# Altium footprint library WR-MJ.PcbLib: 101 footprints (part 6 of 7)
Each footprint in its own frame and in the unit in brackets; x right, y up, seen from the top. Pads: shape width x height; smd on the part's side, far side on the other; paste and mask are expansions set on the pad; w line width, h text height; cw(c..) or ccw(c..) is an arc to the next point about the centre after c.
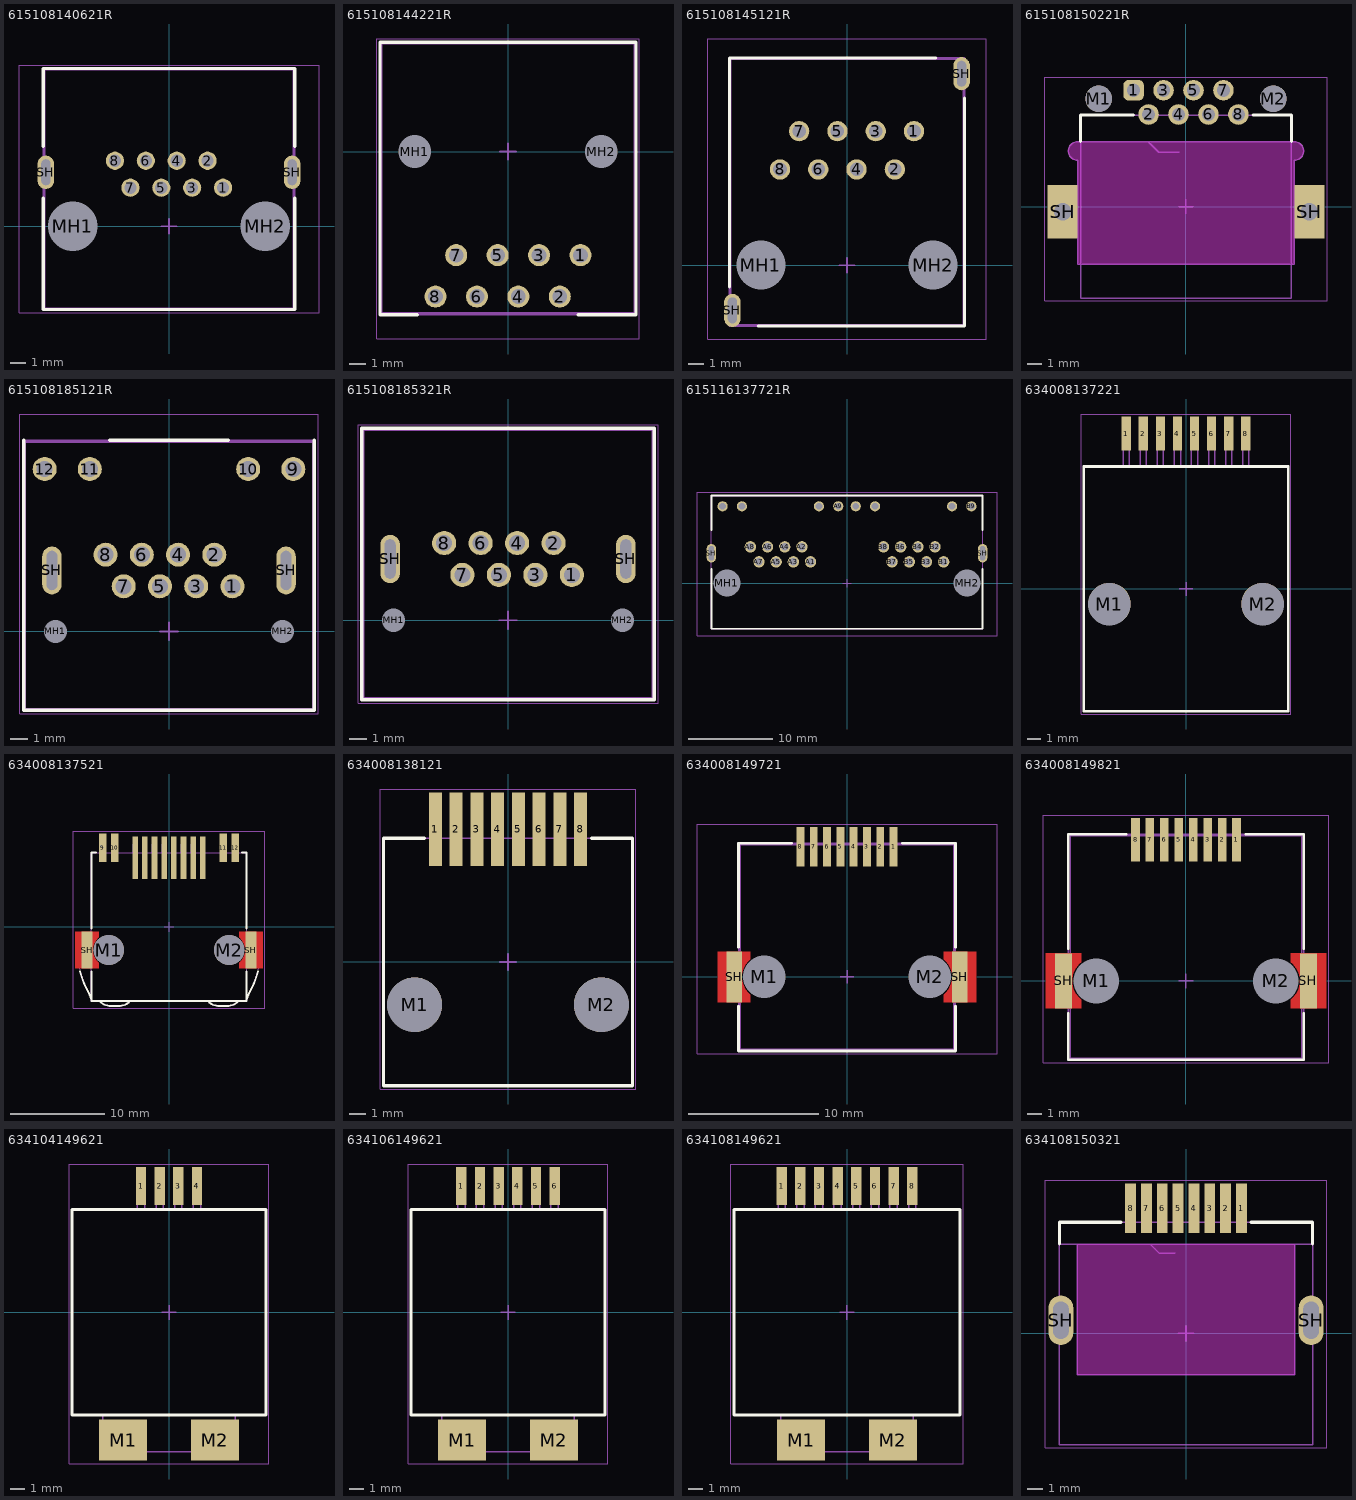
[diagram p5: the footprints below, top view; thin cyan lines are the x and y axes]

## 615108140621R [mm] "Modular Jak"
height 13.5
pads (12):
  round 1.2 hole 0.8: 1(3.57,2.54) 2(2.55,4.32) 3(1.53,2.54) 4(0.51,4.32) 5(-0.51,2.54) 6(-1.53,4.32) 7(-2.55,2.54) 8(-3.57,4.32)
  round 3.15 hole 3.25 unplated: MH1(-6.35,0) MH2(6.35,0)
  oval 1.1x2.2 hole 0.6 slot 1.7 at 90 deg: SH(-8.125,3.56) SH(8.125,3.56)
Top Overlay:
  lines w0.2: -8.3,1.85 -8.3,-5.5 8.3,-5.5 8.3,1.85 ; -8.3,5.25 -8.3,10.41 8.3,10.41 8.3,5.25
Top Paste:
  region: -4.42,6.42 -4.42,3.52 -2.72,3.52 -2.72,6.42
  region: -2.38,6.42 -2.38,3.52 -0.68,3.52 -0.68,6.42
  region: -0.34,6.42 -0.34,3.52 1.36,3.52 1.36,6.42
  region: 1.7,6.42 1.7,3.52 3.4,3.52 3.4,6.42
  region: -1.7,0.44 -1.7,3.34 -3.4,3.34 -3.4,0.44
  region: 0.34,0.44 0.34,3.34 -1.36,3.34 -1.36,0.44
  region: 2.38,0.44 2.38,3.34 0.68,3.34 0.68,0.44
  region: 4.42,0.44 4.42,3.34 2.72,3.34 2.72,0.44
  region: 6.725,5.01 9.525,5.01 9.525,2.11 6.725,2.11
  region: -9.525,5.01 -6.725,5.01 -6.725,2.11 -9.525,2.11
Assembly Notes:
  text "Stencil Thickness 120 um" at -7.571,-6.78 h1.5
Top Assembly:
  lines w0.1: -8.3,-5.5 8.3,-5.5 8.3,10.41 -8.3,10.41 -8.3,-5.5
Top Designator:
  text ".Designator" at -3.647,-0.357 h1
Top 3D Body:
  lines w0.1: -8.2,-5.4 -8.2,10.31 8.2,10.31 8.2,-5.4 -8.2,-5.4
Top Courtyard:
  lines w0.05: -9.9,-5.7 9.9,-5.7 9.9,10.61 -9.9,10.61 -9.9,-5.7
Top Component Center:
  lines w0.1: -0.5,0 0.5,0 ; 0,-0.5 0,0.5
3D body "615108140621R.stp": height 15.06, standoff -2.54, extent -9.7,-5.4 9.7,10.31

## 615108144221R [mm] "Modular Jak"
height 16.41
pads (10):
  round 1.35 hole 0.9: 1(4.445,-6.35) 2(3.175,-8.89) 3(1.905,-6.35) 4(0.635,-8.89) 5(-0.635,-6.35) 6(-1.905,-8.89) 7(-3.175,-6.35) 8(-4.445,-8.89)
  round 1.9 hole 2 unplated: MH1(-5.715,0) MH2(5.715,0)
Top Overlay:
  lines w0.2: -5.55,-10 -7.85,-10 -7.85,6.7 7.85,6.7 7.85,-10 4.3,-10
Top Paste:
  region: -4.025,-3.95 -4.025,-7.55 -2.325,-7.55 -2.325,-3.95
  region: -1.485,-3.95 -1.485,-7.55 0.215,-7.55 0.215,-3.95
  region: 1.055,-3.95 1.055,-7.55 2.755,-7.55 2.755,-3.95
  region: 3.595,-3.95 3.595,-7.55 5.295,-7.55 5.295,-3.95
  region: 4.025,-11.29 4.025,-7.69 2.325,-7.69 2.325,-11.29
  region: 1.485,-11.29 1.485,-7.69 -0.215,-7.69 -0.215,-11.29
  region: -1.055,-11.29 -1.055,-7.69 -2.755,-7.69 -2.755,-11.29
  region: -3.595,-11.29 -3.595,-7.69 -5.295,-7.69 -5.295,-11.29
Assembly Notes:
  text "Stencil Thickness 120 um" at -7.571,-12.68 h1.5
Top Assembly:
  lines w0.1: -7.85,-10 7.85,-10 7.85,6.7 -7.85,6.7 -7.85,-10
Top Designator:
  text ".Designator" at -3.647,-0.357 h1
Top 3D Body:
  lines w0.1: -7.75,-9.9 -7.75,6.6 7.75,6.6 7.75,-9.9 -7.75,-9.9
Top Courtyard:
  lines w0.05: -8.05,-11.49 -8.05,6.9 8.05,6.9 8.05,-11.49 -8.05,-11.49
Top Component Center:
  lines w0.1: -0.5,0 0.5,0 ; 0,-0.5 0,0.5
3D body "615108144221R.stp": height 16.55, standoff -2.51, extent -7.75,-9.9 7.75,6.6

## 615108145121R [mm] "Modular Jak"
height 21.55
pads (12):
  round 1.35 hole 0.9: 1(4.445,8.89) 2(3.175,6.35) 3(1.905,8.89) 4(0.635,6.35) 5(-0.635,8.89) 6(-1.905,6.35) 7(-3.175,8.89) 8(-4.445,6.35)
  round 3.15 hole 3.25 unplated: MH1(-5.715,0) MH2(5.715,0)
  oval 1.1x2.2 hole 0.6 slot 1.7 at 90 deg: SH(-7.6,-3) SH(7.6,12.7)
Top Overlay:
  lines w0.2: -7.8,-1.45 -7.8,13.75 5.9,13.75 ; -5.9,-4.05 7.8,-4.05 7.8,11.1
Top Paste:
  region: 6.15,11.4 9.05,11.4 9.05,14.4 6.15,14.4
  region: -9.05,-1.7 -6.15,-1.7 -6.15,-4.7 -9.05,-4.7
  region: 3.595,7.69 5.295,7.69 5.295,10.89 3.595,10.89
  region: 1.055,7.69 2.755,7.69 2.755,10.89 1.055,10.89
  region: -1.485,7.69 0.215,7.69 0.215,10.89 -1.485,10.89
  region: -4.025,7.69 -2.325,7.69 -2.325,10.89 -4.025,10.89
  region: -5.295,7.55 -3.595,7.55 -3.595,4.35 -5.295,4.35
  region: -2.755,7.55 -1.055,7.55 -1.055,4.35 -2.755,4.35
  region: -0.215,7.55 1.485,7.55 1.485,4.35 -0.215,4.35
  region: 2.325,7.55 4.025,7.55 4.025,4.35 2.325,4.35
Assembly Notes:
  text "Stencil Thickness 120 um" at -7.571,-5.78 h1.5
Top Assembly:
  lines w0.1: -7.8,-4.05 7.8,-4.05 7.8,13.75 -7.8,13.75 -7.8,-4.05
Top Designator:
  text ".Designator" at -3.647,-0.357 h1
Top 3D Body:
  lines w0.1: -7.7,-3.95 -7.7,13.65 7.7,13.65 7.7,-3.95 -7.7,-3.95
Top Courtyard:
  lines w0.05: -9.25,-4.9 9.25,-4.9 9.25,15.004 -9.25,15.004 -9.25,-4.9
Top Component Center:
  lines w0.1: -0.5,0 0.5,0 ; 0,-0.5 0,0.5
3D body "615108145121R.stp": height 22.42, standoff -1.35, extent -7.7,-4.5 7.7,14.804

## 615108150221R [mm] "ModularJack_8P8C_THR_Horizontal_Shielded_Tab Down_UltraLowProfile"
height 10.9
pads (12):
  rrect50% 1.4x1.4 hole 0.9: 1(-3.57,7.925)
  round 1.4 hole 0.9: 2(-2.55,6.275) 3(-1.53,7.925) 4(-0.51,6.275) 5(0.51,7.925) 6(1.53,6.275) 7(2.55,7.925) 8(3.57,6.275)
  round 1.8 hole 1.8 unplated: M1(-5.95,7.345) M2(5.95,7.345)
  rect 2.05x3.63 / inner round 1.8 / far side round 1.8 hole 1.2: SH(-8.4,-0.355) SH(8.4,-0.355)
Top Overlay:
  lines w0.2: -7.175,4.425 -7.175,6.225 -3.575,6.225 ; 4.575,6.225 7.175,6.225 7.175,4.425
Top Paste:
  region: -9.425,1.46 -7.375,1.46 -7.375,-2.17 -9.425,-2.17
  region: 7.375,1.46 9.425,1.46 9.425,-2.17 7.375,-2.17
Keep-Out Layer:
  board cut-out: -7.375,-3.935 7.375,-3.935 7.375,3.145 7.502,3.145 7.738,3.242 7.918,3.422 8.015,3.658 8.015,3.912 7.918,4.148 7.738,4.328 7.502,4.425 7.375,4.425 -7.375,4.425 -7.502,4.425 -7.738,4.328 -7.918,4.148 -8.015,3.912 -8.015,3.658 -7.918,3.422 -7.738,3.242 -7.502,3.145 -7.375,3.145
Assembly Notes:
  lines w0.1: -7.175,4.425 7.175,4.425 ; -2.55,4.4 -1.85,3.7 -0.45,3.7 ; -7.375,-3.935 -7.375,3.145 cw(c-7.375,3.785) -7.375,4.425 7.375,4.425 cw(c7.375,3.785) 7.375,3.145 7.375,-3.935 -7.375,-3.935
  text "PCB Cutout" at -4.4,-0.615 h1.22
  text "PCB End" at -0.226,3.5 h0.5
Top Assembly:
  lines w0.1: -7.175,-6.225 7.175,-6.225 7.175,6.225 -7.175,6.225 -7.175,-6.225
Top Designator:
  text ".Designator" at -3.647,-0.357 h1
Top Courtyard:
  lines w0.05: -9.625,-6.425 9.625,-6.425 9.625,8.825 -9.625,8.825 -9.625,-6.425
Top Component Center:
  lines w0.1: -0.5,0 0.5,0 ; 0,-0.5 0,0.5
3D body "615108150221R.stp": height 7.4, standoff -3.25, extent -8.95,-6.225 8.95,8.168

## 615108185121R [mm] "Modular Jak"
height 11.3
pads (16):
  round 1.35 hole 0.9: 1(3.57,2.54) 2(2.55,4.32) 3(1.53,2.54) 4(0.51,4.32) 5(-0.51,2.54) 6(-1.53,4.32) 7(-2.55,2.54) 8(-3.57,4.32) 9(7,9.14) 10(4.46,9.14) 11(-4.46,9.14) 12(-7,9.14)
  round 1.2 hole 1.3 unplated: MH1(-6.4,0) MH2(6.4,0)
  oval 1.1x2.7 hole 0.6 slot 2.2 at 90 deg: SH(-6.59,3.43) SH(6.59,3.43)
Top Overlay:
  lines w0.2: -8.19,10.75 -8.19,-4.45 8.19,-4.45 8.19,10.75 ; -3.34,10.75 3.34,10.75
Top Paste:
  region: 5.49,5.03 5.49,1.83 7.69,1.83 7.69,5.03
  region: -7.69,5.03 -7.69,1.83 -5.49,1.83 -5.49,5.03
  region: -7.85,12.04 -7.85,8.34 -6.15,8.34 -6.15,12.04
  region: -5.31,12.04 -5.31,8.34 -3.61,8.34 -3.61,12.04
  region: 3.61,12.04 3.61,8.34 5.31,8.34 5.31,12.04
  region: 6.15,12.04 6.15,8.34 7.85,8.34 7.85,12.04
  region: -4.42,7.22 -4.42,3.52 -2.72,3.52 -2.72,7.22
  region: -2.38,7.22 -2.38,3.52 -0.68,3.52 -0.68,7.22
  region: -0.34,7.22 -0.34,3.52 1.36,3.52 1.36,7.22
  region: 1.7,7.22 1.7,3.52 3.4,3.52 3.4,7.22
  region: 4.42,-0.36 4.42,3.34 2.72,3.34 2.72,-0.36
  region: 2.38,-0.36 2.38,3.34 0.68,3.34 0.68,-0.36
  region: 0.34,-0.36 0.34,3.34 -1.36,3.34 -1.36,-0.36
  region: -1.7,-0.36 -1.7,3.34 -3.4,3.34 -3.4,-0.36
Assembly Notes:
  text "Stencil Thickness 120 um" at -7.571,-5.73 h1.5
Top Assembly:
  lines w0.1: -8.19,-4.45 -8.19,10.75 8.19,10.75 8.19,-4.45 -8.19,-4.45
Top Designator:
  text ".Designator" at -3.647,-0.357 h1
Top 3D Body:
  lines w0.1: -8.09,-4.35 -8.09,10.65 8.09,10.65 8.09,-4.35 -8.09,-4.35
Top Courtyard:
  lines w0.05: -8.39,-4.65 8.39,-4.65 8.39,12.24 -8.39,12.24 -8.39,-4.65
Top Component Center:
  lines w0.1: -0.5,0 0.5,0 ; 0,-0.5 0,0.5
3D body "615108185121R.stp": height 11.35, standoff -2.15, extent -8.09,-4.35 8.09,10.65

## 615108185321R [mm] "Modular Jak"
height 11.3
pads (12):
  round 1.35 hole 0.9: 1(3.57,2.54) 2(2.55,4.32) 3(1.53,2.54) 4(0.51,4.32) 5(-0.51,2.54) 6(-1.53,4.32) 7(-2.55,2.54) 8(-3.57,4.32)
  round 1.2 hole 1.3 unplated: MH1(-6.4,0) MH2(6.4,0)
  oval 1.1x2.7 hole 0.6 slot 2.2 at 90 deg: SH(-6.59,3.43) SH(6.59,3.43)
Top Overlay:
  lines w0.2: -8.19,-4.45 8.19,-4.45 8.19,10.75 -8.19,10.75 -8.19,-4.45
Top Paste:
  region: -7.69,5.03 -5.49,5.03 -5.49,1.83 -7.69,1.83
  region: 5.49,5.03 7.69,5.03 7.69,1.83 5.49,1.83
  region: -4.42,7.22 -4.42,3.52 -2.72,3.52 -2.72,7.22
  region: -2.38,7.22 -2.38,3.52 -0.68,3.52 -0.68,7.22
  region: -0.34,7.22 -0.34,3.52 1.36,3.52 1.36,7.22
  region: 1.7,7.22 1.7,3.52 3.4,3.52 3.4,7.22
  region: 4.42,-0.36 4.42,3.34 2.72,3.34 2.72,-0.36
  region: 2.38,-0.36 2.38,3.34 0.68,3.34 0.68,-0.36
  region: 0.34,-0.36 0.34,3.34 -1.36,3.34 -1.36,-0.36
  region: -1.7,-0.36 -1.7,3.34 -3.4,3.34 -3.4,-0.36
Assembly Notes:
  text "Stencil Thickness 120 um" at -7.571,-5.68 h1.5
Top Assembly:
  lines w0.1: -8.19,-4.45 8.19,-4.45 8.19,10.75 -8.19,10.75 -8.19,-4.45
Top Designator:
  text ".Designator" at -3.647,-0.357 h1
Top 3D Body:
  lines w0.1: -8.09,-4.35 8.09,-4.35 8.09,10.65 -8.09,10.65 -8.09,-4.35
Top Courtyard:
  lines w0.05: -8.39,-4.65 8.39,-4.65 8.39,10.95 -8.39,10.95 -8.39,-4.65
Top Component Center:
  lines w0.1: -0.5,0 0.5,0 ; 0,-0.5 0,0.5
3D body "615108185321R.stp": height 11.35, standoff -2.35, extent -8.09,-4.35 8.09,10.65

## 615116137721R [mm] "ConMJ Modular Jack Tab Up"
height 13.4
pads (28):
  round 1.35 hole 0.9: A1(-4.33,2.54) A2(-5.35,4.32) A3(-6.37,2.54) A4(-7.39,4.32) A5(-8.41,2.54) A6(-9.43,4.32) A7(-10.45,2.54) A8(-11.47,4.32) B1(11.47,2.54) B2(10.45,4.32) B3(9.43,2.54) B4(8.41,4.32) B5(7.39,2.54) B6(6.37,4.32) B7(5.35,2.54) B8(4.33,4.32)
  round 1.2 hole 0.8: A9(-1.04,9.13) A10(-3.33,9.13) A11(-12.47,9.13) A12(-14.76,9.13) B9(14.76,9.13) B10(12.47,9.13) B11(3.33,9.13) B12(1.04,9.13)
  round 3.1 hole 3.2 unplated: MH1(-14.25,0) MH2(14.25,0)
  oval 1.1x2.2 hole 0.6 slot 1.7 at 90 deg: SH(-16.1,3.56) SH(16.1,3.56)
Top Overlay:
  lines w0.2: -16.085,1.7 -16.085,-5.4 16.085,-5.4 16.085,1.7 ; -16.085,6.3 -16.085,10.4 16.085,10.4 16.085,6.3
Top Paste:
  region: -17.6,6.06 -17.6,1.96 -14.6,1.96 -14.6,6.06
  region: 14.6,6.06 14.6,1.96 17.6,1.96 17.6,6.06
  region: -15.36,9.73 -14.16,9.73 -14.16,8.53 -15.36,8.53
  region: -13.07,9.73 -11.87,9.73 -11.87,8.53 -13.07,8.53
  region: -3.93,9.73 -2.73,9.73 -2.73,8.53 -3.93,8.53
  region: -1.64,9.73 -0.44,9.73 -0.44,8.53 -1.64,8.53
  region: 0.44,9.73 1.64,9.73 1.64,8.53 0.44,8.53
  region: 2.73,9.73 3.93,9.73 3.93,8.53 2.73,8.53
  region: 11.87,9.73 13.07,9.73 13.07,8.53 11.87,8.53
  region: 14.16,9.73 15.36,9.73 15.36,8.53 14.16,8.53
  region: -12.32,3.52 -10.62,3.52 -10.62,7.22 -12.32,7.22
  region: -10.28,3.52 -8.58,3.52 -8.58,7.22 -10.28,7.22
  region: -8.24,3.52 -6.54,3.52 -6.54,7.22 -8.24,7.22
  region: -6.2,3.52 -4.5,3.52 -4.5,7.22 -6.2,7.22
  region: -11.3,3.34 -9.6,3.34 -9.6,-0.36 -11.3,-0.36
  region: -9.26,3.34 -7.56,3.34 -7.56,-0.36 -9.26,-0.36
  region: -7.22,3.34 -5.52,3.34 -5.52,-0.36 -7.22,-0.36
  region: -5.18,3.34 -3.48,3.34 -3.48,-0.36 -5.18,-0.36
  region: 3.48,3.52 5.18,3.52 5.18,7.22 3.48,7.22
  region: 5.52,3.52 7.22,3.52 7.22,7.22 5.52,7.22
  region: 7.56,3.52 9.26,3.52 9.26,7.22 7.56,7.22
  region: 9.6,3.52 11.3,3.52 11.3,7.22 9.6,7.22
  region: 4.5,3.34 6.2,3.34 6.2,-0.36 4.5,-0.36
  region: 6.54,3.34 8.24,3.34 8.24,-0.36 6.54,-0.36
  region: 8.58,3.34 10.28,3.34 10.28,-0.36 8.58,-0.36
  region: 10.62,3.34 12.32,3.34 12.32,-0.36 10.62,-0.36
Assembly Notes:
  text "Stencil Thickness 120 um" at -7.571,-7.26 h1.5
Top Assembly:
  lines w0.1: -16.085,-5.4 -16.085,10.4 16.085,10.4 16.085,-5.4 -16.085,-5.4
Top Designator:
  text ".Designator" at -3.647,-0.357 h1
Top 3D Body:
  lines w0.1: -16.085,-5.4 -16.085,10.4 16.085,10.4 16.085,-5.4 -16.085,-5.4
Top Courtyard:
  lines w0.05: -17.8,-6.263 17.8,-6.263 17.8,10.825 -17.8,10.825 -17.8,-6.263
Top Component Center:
  lines w0.1: -0.5,0 0.5,0 ; 0,-0.5 0,0.5
3D body "615116137721R.stp": height 15.71, standoff -1.98, extent -17.179,-6.063 17.179,10.625

## 634008137221 [mm] "Modular Jack SMT Horizontal Plastic 8P8C Tab Down"
height 12
pads (10):
  rect 0.7x2.54 smd: 1(-4.445,11.57) 2(-3.175,11.57) 3(-1.905,11.57) 4(-0.635,11.57) 5(0.635,11.57) 6(1.905,11.57) 7(3.175,11.57) 8(4.445,11.57)
  round 3.17 hole 3.17 unplated: M1(-5.715,-1.13) M2(5.715,-1.13)
Top Overlay:
  lines w0.2: -7.62,-9.13 -7.62,9.13 7.62,9.13 7.62,-9.13 -7.62,-9.13
Top Assembly:
  lines w0.1: -4.67,9.13 -4.67,11.93 -4.22,11.93 -4.22,9.13 ; -3.4,9.13 -3.4,11.93 -2.95,11.93 -2.95,9.13 ; -2.13,9.13 -2.13,11.93 -1.68,11.93 -1.68,9.13 ; -0.86,9.13 -0.86,11.93 -0.41,11.93 -0.41,9.13 ; 0.41,9.13 0.41,11.93 0.86,11.93 0.86,9.13 ; 1.68,9.13 1.68,11.93 2.13,11.93 2.13,9.13 ; 2.95,9.13 2.95,11.93 3.4,11.93 3.4,9.13 ; 4.22,9.13 4.22,11.93 4.67,11.93 4.67,9.13 ; -7.62,-9.13 7.62,-9.13 7.62,9.13 -7.62,9.13 -7.62,-9.13
Top Designator:
  text ".Designator" at -3.647,-0.357 h1
Top Courtyard:
  lines w0.05: -7.82,-9.33 -7.82,13.04 7.82,13.04 7.82,-9.33 -7.82,-9.33
Top Component Center:
  lines w0.1: -0.5,0 0.5,0 ; 0,-0.5 0,0.5
3D body "634008137221 (rev1).stp": height 12.95, standoff -3.41, extent -7.62,-9.13 7.62,11.928

## 634008137521 [mm] "Modular Jack Horizontal Shielded SMT with LED and EMI Panel Finger 8P8C Tab Up"
height 13.1
pads (16):
  rect 0.61x4.5 smd: 1(3.57,7.31) 2(2.55,7.31) 3(1.53,7.31) 4(0.51,7.31) 5(-0.51,7.31) 6(-1.53,7.31) 7(-2.55,7.31) 8(-3.57,7.31)
  rect 0.8x3.05 smd: 9(-6.98,8.35) 10(-5.71,8.35) 11(5.71,8.35) 12(6.98,8.35)
  round 3.2 hole 3.2 unplated: M1(-6.35,-2.45) M2(6.35,-2.45)
  rect 1.2x3.89 smd paste-403.566 mask-403.566: SH(-8.66,-2.45) SH(8.66,-2.45)
Top Layer:
  region: -9.905,-4.395 -7.415,-4.395 -7.415,-3.777 -7.416,-3.777 -7.557,-3.65 -7.793,-3.352 -7.957,-3.01 -8.041,-2.639 -8.041,-2.26 -7.957,-1.889 -7.793,-1.547 -7.556,-1.249 -7.415,-1.122 -7.415,-0.505 -9.905,-0.505
  region: 9.905,-4.395 7.415,-4.395 7.415,-3.777 7.416,-3.777 7.557,-3.65 7.793,-3.352 7.957,-3.01 8.041,-2.639 8.041,-2.26 7.957,-1.889 7.793,-1.547 7.556,-1.249 7.415,-1.122 7.415,-0.505 9.905,-0.505
Top Overlay:
  lines w0.2: -9.406,-4.685 ccw(c-0.032,-2.203) -8.492,-6.943 cw(c-11.947,-8.744) -8.2,-7.675 ; -8.2,-4.7 -8.2,-7.85 8.2,-7.85 8.2,-4.7 ; -8.2,-0.2 -8.2,7.85 -7.7,7.85 ; -7.331,-7.851 ccw(c-6.167,-6.753) -6.07,-8.35 -5.37,-8.35 ccw(c-5.273,-6.753) -4.109,-7.851 ; 4.109,-7.851 ccw(c5.273,-6.753) 5.37,-8.35 6.07,-8.35 ccw(c6.167,-6.753) 7.331,-7.851 ; 7.7,7.85 8.2,7.85 8.2,-0.2 ; 8.2,-7.675 cw(c11.947,-8.744) 8.492,-6.943 ccw(c0.032,-2.203) 9.406,-4.685
Top Assembly:
  lines w0.1: -9.754,-1.207 ccw(c1.065,-1.649) -9.721,-2.609 ccw(c-0.032,-2.203) -8.492,-6.943 cw(c-11.947,-8.744) -8.2,-7.675 ; -7.331,-7.851 ccw(c-6.167,-6.753) -6.07,-8.35 -5.37,-8.35 ccw(c-5.273,-6.753) -4.109,-7.851 ; -7.205,7.85 -7.205,9.55 -6.755,9.55 -6.755,7.85 ; -5.935,7.85 -5.935,9.55 -5.485,9.55 -5.485,7.85 ; -3.795,7.85 -3.795,8.75 -3.345,8.75 -3.345,7.85 ; -2.775,7.85 -2.775,8.75 -2.325,8.75 -2.325,7.85 ; -1.755,7.85 -1.755,8.75 -1.305,8.75 -1.305,7.85 ; -0.735,7.85 -0.735,8.75 -0.285,8.75 -0.285,7.85 ; 0.285,7.85 0.285,8.75 0.735,8.75 0.735,7.85 ; 1.305,7.85 1.305,8.75 1.755,8.75 1.755,7.85 ; 2.325,7.85 2.325,8.75 2.775,8.75 2.775,7.85 ; 3.345,7.85 3.345,8.75 3.795,8.75 3.795,7.85 ; 4.109,-7.851 ccw(c5.273,-6.753) 5.37,-8.35 6.07,-8.35 ccw(c6.167,-6.753) 7.331,-7.851 ; 5.485,7.85 5.485,9.55 5.935,9.55 5.935,7.85 ; 6.755,7.85 6.755,9.55 7.205,9.55 7.205,7.85 ; 8.2,-7.675 cw(c11.947,-8.744) 8.492,-6.943 ccw(c0.032,-2.203) 9.721,-2.609 ccw(c-1.065,-1.649) 9.754,-1.207 ; -8.2,-7.85 8.2,-7.85 8.2,7.85 -8.2,7.85 -8.2,-7.85
Top Designator:
  text ".Designator" at -3.647,-0.357 h1
Top Courtyard:
  lines w0.05: -10.11,-8.595 10.11,-8.595 10.11,10.075 -10.11,10.075 -10.11,-8.595
Top Component Center:
  lines w0.1: -0.5,0 0.5,0 ; 0,-0.5 0,0.5
3D body "634008137521.stp": height 15.02, standoff -1.38, extent -9.8,-8.45 9.8,9.55

## 634008138121 [mm] "Modular Jack SMT Vertical Plastic 8P8C"
height 15.24
pads (10):
  rect 0.8x4.5 smd: 1(-4.445,8.135) 2(-3.175,8.135) 3(-1.905,8.135) 4(-0.635,8.135) 5(0.635,8.135) 6(1.905,8.135) 7(3.175,8.135) 8(4.445,8.135)
  round 3.35 hole 3.35 unplated: M1(-5.715,-2.615) M2(5.715,-2.615)
Top Overlay:
  lines w0.2: -5.12,7.575 -7.62,7.575 -7.62,-7.575 7.62,-7.575 7.62,7.575 5.12,7.575
Top Assembly:
  lines w0.1: -4.645,7.575 -4.645,9.875 -4.245,9.875 -4.245,7.575 ; -3.375,7.575 -3.375,9.875 -2.975,9.875 -2.975,7.575 ; -2.105,7.575 -2.105,9.875 -1.705,9.875 -1.705,7.575 ; -0.835,7.575 -0.835,9.875 -0.435,9.875 -0.435,7.575 ; 0.435,7.575 0.435,9.875 0.835,9.875 0.835,7.575 ; 1.705,7.575 1.705,9.875 2.105,9.875 2.105,7.575 ; 2.975,7.575 2.975,9.875 3.375,9.875 3.375,7.575 ; 4.245,7.575 4.245,9.875 4.645,9.875 4.645,7.575 ; -7.62,-7.575 7.62,-7.575 7.62,7.575 -7.62,7.575 -7.62,-7.575
Top Designator:
  text ".Designator" at -3.647,-0.357 h1
Top Courtyard:
  lines w0.05: -7.82,-7.775 7.82,-7.775 7.82,10.585 -7.82,10.585 -7.82,-7.775
Top Component Center:
  lines w0.1: -0.5,0 0.5,0 ; 0,-0.5 0,0.5
3D body "634008138121.stp": height 13.05, standoff -2.65, extent -7.62,-7.575 7.62,9.875

## 634008149721 [mm] "Modular Jack Horizontal Shielded SMT with EMI Panel Finger 8P8C"
height 13.5
pads (12):
  rect 0.61x3.05 smd: 1(3.57,9.98) 2(2.55,9.98) 3(1.53,9.98) 4(0.51,9.98) 5(-0.51,9.98) 6(-1.53,9.98) 7(-2.55,9.98) 8(-3.57,9.98)
  round 3.15 hole 3.25 unplated: M1(-6.35,0) M2(6.35,0)
  rect 1.2x3.89 smd paste-403.566 mask-403.566: SH(-8.66,0) SH(8.66,0)
Top Layer:
  region: 9.91,-1.945 7.41,-1.945 7.41,-1.363 7.558,-1.234 7.805,-0.93 7.978,-0.578 8.066,-0.196 8.066,0.196 7.977,0.578 7.805,0.93 7.558,1.234 7.41,1.363 7.41,1.945 9.91,1.945
  region: -9.91,-1.945 -7.41,-1.945 -7.41,-1.363 -7.558,-1.234 -7.805,-0.93 -7.978,-0.578 -8.066,-0.196 -8.066,0.196 -7.977,0.578 -7.805,0.93 -7.558,1.234 -7.41,1.363 -7.41,1.945 -9.91,1.945
Top Overlay:
  lines w0.2: -8.325,-2.26 -8.325,-5.685 8.325,-5.685 8.325,-2.26 ; -8.325,2.29 -8.325,10.265 -4.225,10.265 ; 4.225,10.265 8.325,10.265 8.325,2.29
Top Assembly:
  lines w0.1: -8.325,-5.685 -8.325,10.265 8.325,10.265 8.325,-5.685 -8.325,-5.685
Top Designator:
  text ".Designator" at -3.647,-0.357 h1
Top 3D Body:
  lines w0.1: -8.2,-5.56 -8.2,10.14 8.2,10.14 8.2,-5.56 -8.2,-5.56
Top Courtyard:
  lines w0.05: -11.51,-5.885 11.51,-5.885 11.51,11.705 -11.51,11.705 -11.51,-5.885
Top Component Center:
  lines w0.1: -0.5,0 0.5,0 ; 0,-0.5 0,0.5
3D body "634008149721.stp": height 16.62, standoff -1.18, extent -11.31,-5.56 11.31,10.74

## 634008149821 [mm] "Modular Jack Horizontal Shielded SMT 8P8C Tab Up"
height 13.5
pads (12):
  rect 0.61x3.05 smd: 1(3.57,9.98) 2(2.55,9.98) 3(1.53,9.98) 4(0.51,9.98) 5(-0.51,9.98) 6(-1.53,9.98) 7(-2.55,9.98) 8(-3.57,9.98)
  round 3.1 hole 3.2 unplated: M1(-6.35,0) M2(6.35,0)
  rect 1.2x3.89 smd paste-403.566 mask-403.566: SH(-8.66,0) SH(8.66,0)
Top Layer:
  region: -9.91,-1.945 -7.41,-1.945 -7.41,-1.332 -7.553,-1.204 -7.791,-0.906 -7.956,-0.563 -8.041,-0.191 -8.041,0.191 -7.956,0.563 -7.791,0.906 -7.553,1.204 -7.41,1.332 -7.41,1.945 -9.91,1.945
  region: 9.91,-1.945 7.41,-1.945 7.41,-1.332 7.553,-1.204 7.791,-0.906 7.956,-0.563 8.041,-0.191 8.041,0.191 7.956,0.563 7.791,0.906 7.553,1.204 7.41,1.332 7.41,1.945 9.91,1.945
Top Overlay:
  lines w0.2: -8.325,-2.3 -8.325,-5.575 8.325,-5.575 8.325,-2.3 ; -8.325,2.3 -8.325,10.375 -4.225,10.375 ; 4.225,10.375 8.325,10.375 8.325,2.3
Top Assembly:
  lines w0.1: -8.325,-5.575 8.325,-5.575 8.325,10.375 -8.325,10.375 -8.325,-5.575
Top Designator:
  text ".Designator" at -3.647,-0.357 h1
Top 3D Body:
  lines w0.1: -8.2,-5.45 8.2,-5.45 8.2,10.25 -8.2,10.25 -8.2,-5.45
Top Courtyard:
  lines w0.05: -10.11,-5.775 10.11,-5.775 10.11,11.705 -10.11,11.705 -10.11,-5.775
Top Component Center:
  lines w0.1: -0.5,0 0.5,0 ; 0,-0.5 0,0.5
3D body "634008149821.stp": height 13.6, standoff -1.1, extent -9.4,-5.45 9.4,10.83

## 634104149621 [mm] "Modular Jack SMT Vertical Plastic 4P4C Top Entry"
height 12.9
pads (6):
  rect 0.7x2.6 smd: 1(-1.905,8.6) 2(-0.635,8.6) 3(0.635,8.6) 4(1.905,8.6)
  rect 3.25x2.8 smd: M1(-3.125,-8.7) M2(3.125,-8.7)
Top Overlay:
  lines w0.2: -6.6,-7 6.6,-7 6.6,7 -6.6,7 -6.6,-7
Top Assembly:
  lines w0.1: -4.5,-7 -4.5,-9.5 4.5,-9.5 4.5,-7 ; -2.155,7 -2.155,9 -1.655,9 -1.655,7 ; -0.885,7 -0.885,9 -0.385,9 -0.385,7 ; 0.385,7 0.385,9 0.885,9 0.885,7 ; 1.655,7 1.655,9 2.155,9 2.155,7 ; -6.6,-7 -6.6,7 6.6,7 6.6,-7 -6.6,-7
Top Designator:
  text ".Designator" at -3.647,-0.357 h1
Top Courtyard:
  lines w0.05: -6.8,-10.3 6.8,-10.3 6.8,10.1 -6.8,10.1 -6.8,-10.3
Top Component Center:
  lines w0.1: -0.5,0 0.5,0 ; 0,-0.5 0,0.5
3D body "634104149621.stp": height 13.04, standoff -0.03, extent -6.66,-9.505 6.66,9.004

## 634106149621 [mm] "Modular Jack SMT Vertical Plastic 6P6C Top Entry"
height 12.9
pads (8):
  rect 0.7x2.6 smd: 1(-3.175,8.6) 2(-1.905,8.6) 3(-0.635,8.6) 4(0.635,8.6) 5(1.905,8.6) 6(3.175,8.6)
  rect 3.25x2.8 smd: M1(-3.125,-8.7) M2(3.125,-8.7)
Top Overlay:
  lines w0.2: -6.6,-7 6.6,-7 6.6,7 -6.6,7 -6.6,-7
Top Assembly:
  lines w0.1: -4.5,-7 -4.5,-9.5 4.5,-9.5 4.5,-7 ; -3.425,7 -3.425,9 -2.925,9 -2.925,7 ; -2.155,7 -2.155,9 -1.655,9 -1.655,7 ; -0.885,7 -0.885,9 -0.385,9 -0.385,7 ; 0.385,7 0.385,9 0.885,9 0.885,7 ; 1.655,7 1.655,9 2.155,9 2.155,7 ; 2.925,7 2.925,9 3.425,9 3.425,7 ; -6.6,-7 -6.6,7 6.6,7 6.6,-7 -6.6,-7
Top Designator:
  text ".Designator" at -3.647,-0.357 h1
Top Courtyard:
  lines w0.05: -6.8,-10.3 -6.8,10.1 6.8,10.1 6.8,-10.3 -6.8,-10.3
Top Component Center:
  lines w0.1: -0.5,0 0.5,0 ; 0,-0.5 0,0.5
3D body "634106149621.stp": height 13.07, standoff 0, extent -6.66,-9.505 6.66,9.004

## 634108149621 [mm] "Modular Jack SMT Vertical Plastic 8P8C Top Entry"
height 13
pads (10):
  rect 0.7x2.6 smd: 1(-4.445,8.6) 2(-3.175,8.6) 3(-1.905,8.6) 4(-0.635,8.6) 5(0.635,8.6) 6(1.905,8.6) 7(3.175,8.6) 8(4.445,8.6)
  rect 3.25x2.8 smd: M1(-3.125,-8.7) M2(3.125,-8.7)
Top Overlay:
  lines w0.2: -7.7,-7 -7.7,7 7.7,7 7.7,-7 -7.7,-7
Top Assembly:
  lines w0.1: -4.695,7 -4.695,9 -4.195,9 -4.195,7 ; -4.5,-7 -4.5,-9.5 4.5,-9.5 4.5,-7 ; -3.425,7 -3.425,9 -2.925,9 -2.925,7 ; -2.155,7 -2.155,9 -1.655,9 -1.655,7 ; -0.885,7 -0.885,9 -0.385,9 -0.385,7 ; 0.385,7 0.385,9 0.885,9 0.885,7 ; 1.655,7 1.655,9 2.155,9 2.155,7 ; 2.925,7 2.925,9 3.425,9 3.425,7 ; 4.195,7 4.195,9 4.695,9 4.695,7 ; -7.7,-7 7.7,-7 7.7,7 -7.7,7 -7.7,-7
Top Designator:
  text ".Designator" at -3.647,-0.357 h1
Top Courtyard:
  lines w0.05: -7.9,-10.3 -7.9,10.1 7.9,10.1 7.9,-10.3 -7.9,-10.3
Top Component Center:
  lines w0.1: -0.5,0 0.5,0 ; 0,-0.5 0,0.5
3D body "634108149621.stp": height 13.09, standoff 0.02, extent -7.76,-9.5 7.76,9.009

## 634108150321 [mm] "Horizontal Mid-Mount Shielded_1x1 - SMT"
height 11.45
pads (10):
  rect 0.7x3.2 smd: 1(3.57,8.05) 2(2.55,8.05) 3(1.53,8.05) 4(0.51,8.05) 5(-0.51,8.05) 6(-1.53,8.05) 7(-2.55,8.05) 8(-3.57,8.05)
  oval 1.6x3.2 hole 1 slot 2.4 at 90 deg: SH(-8.05,0.85) SH(8.05,0.85)
Top Overlay:
  lines w0.2: -8.15,5.75 -8.15,7.15 -4.2,7.15 ; 4.2,7.15 8.15,7.15 8.15,5.75
Keep-Out Layer:
  board cut-out: -7,-2.65 7,-2.65 7,5.75 -7,5.75
Assembly Notes:
  lines w0.1: -8.15,5.75 8.15,5.75 ; -2.3,5.75 -1.7,5.15 -0.7,5.15 ; -7,-2.65 -7,5.75 7,5.75 7,-2.65 -7,-2.65
  text "PCB End" at -0.326,4.8 h0.5
  text "PCB Cutout" at -3.4,0.9 h1.02
Top Assembly:
  lines w0.1: -3.795,7.15 -3.795,8.95 -3.345,8.95 -3.345,7.15 ; -2.775,7.15 -2.775,8.95 -2.325,8.95 -2.325,7.15 ; -1.755,7.15 -1.755,8.95 -1.305,8.95 -1.305,7.15 ; -0.735,7.15 -0.735,8.95 -0.285,8.95 -0.285,7.15 ; 0.285,7.15 0.285,8.95 0.735,8.95 0.735,7.15 ; 1.305,7.15 1.305,8.95 1.755,8.95 1.755,7.15 ; 2.325,7.15 2.325,8.95 2.775,8.95 2.775,7.15 ; 3.345,7.15 3.345,8.95 3.795,8.95 3.795,7.15 ; -8.15,-7.15 -8.15,7.15 8.15,7.15 8.15,-7.15 -8.15,-7.15
Top Designator:
  text ".Designator" at -3.647,-0.357 h1
Top Courtyard:
  lines w0.05: -9.05,-7.35 9.05,-7.35 9.05,9.85 -9.05,9.85 -9.05,-7.35
Top Component Center:
  lines w0.1: -0.5,0 0.5,0 ; 0,-0.5 0,0.5
3D body "Download_STP_634108150321 (rev1).stp": height 8.77, standoff -2.53, extent -8.41,-7.15 8.41,8.95